# Altium footprint library 61300821821.PcbLib: 1 footprints
Each footprint in its own frame and in the unit in brackets; x right, y up, seen from the top. Pads: shape width x height; smd on the part's side, far side on the other; paste and mask are expansions set on the pad; w line width, h text height; cw(c..) or ccw(c..) is an arc to the next point about the centre after c.
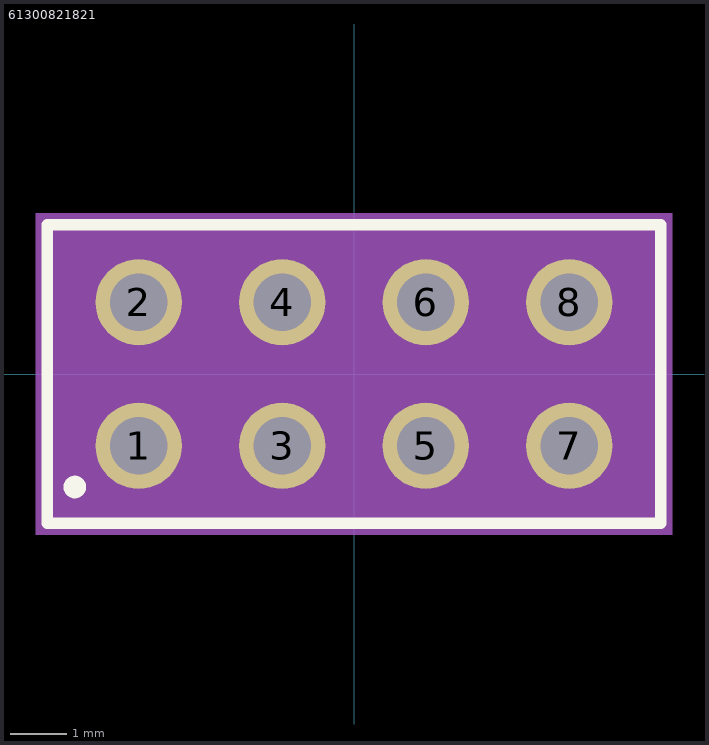
[diagram p0: the footprint, top view; thin cyan lines are the x and y axes]

## 61300821821 [mm]
pads (8):
  round 1.53 hole 1.02: 1(-3.81,-1.27) 2(-3.81,1.27) 3(-1.27,-1.27) 4(-1.27,1.27) 5(1.27,-1.27) 6(1.27,1.27) 7(3.81,-1.27) 8(3.81,1.27)
Top Overlay:
  circle w0.2: c-4.94,-2 r0.1
  lines w0.2: -5.43,-2.64 -5.43,2.64 5.43,2.64 5.43,-2.64 -5.43,-2.64
Assembly Top:
  lines w0.1: -5.33,-2.54 5.33,-2.54 5.33,2.54 -5.33,2.54 -5.33,-2.54
Courtyard Top:
  region: 5.63,-2.84 -5.63,-2.84 -5.63,2.84 5.63,2.84
3D body "step_temp.STEP": height 2.54, standoff -2.54, extent -5.33,-4.25 5.33,7.35